# Altium footprint library MY_LIB_Connectors_JST.PcbLib: 118 footprints (part 7 of 8)
Each footprint in its own frame and in the unit in brackets; x right, y up, seen from the top. Pads: shape width x height; smd on the part's side, far side on the other; paste and mask are expansions set on the pad; w line width, h text height; cw(c..) or ccw(c..) is an arc to the next point about the centre after c.
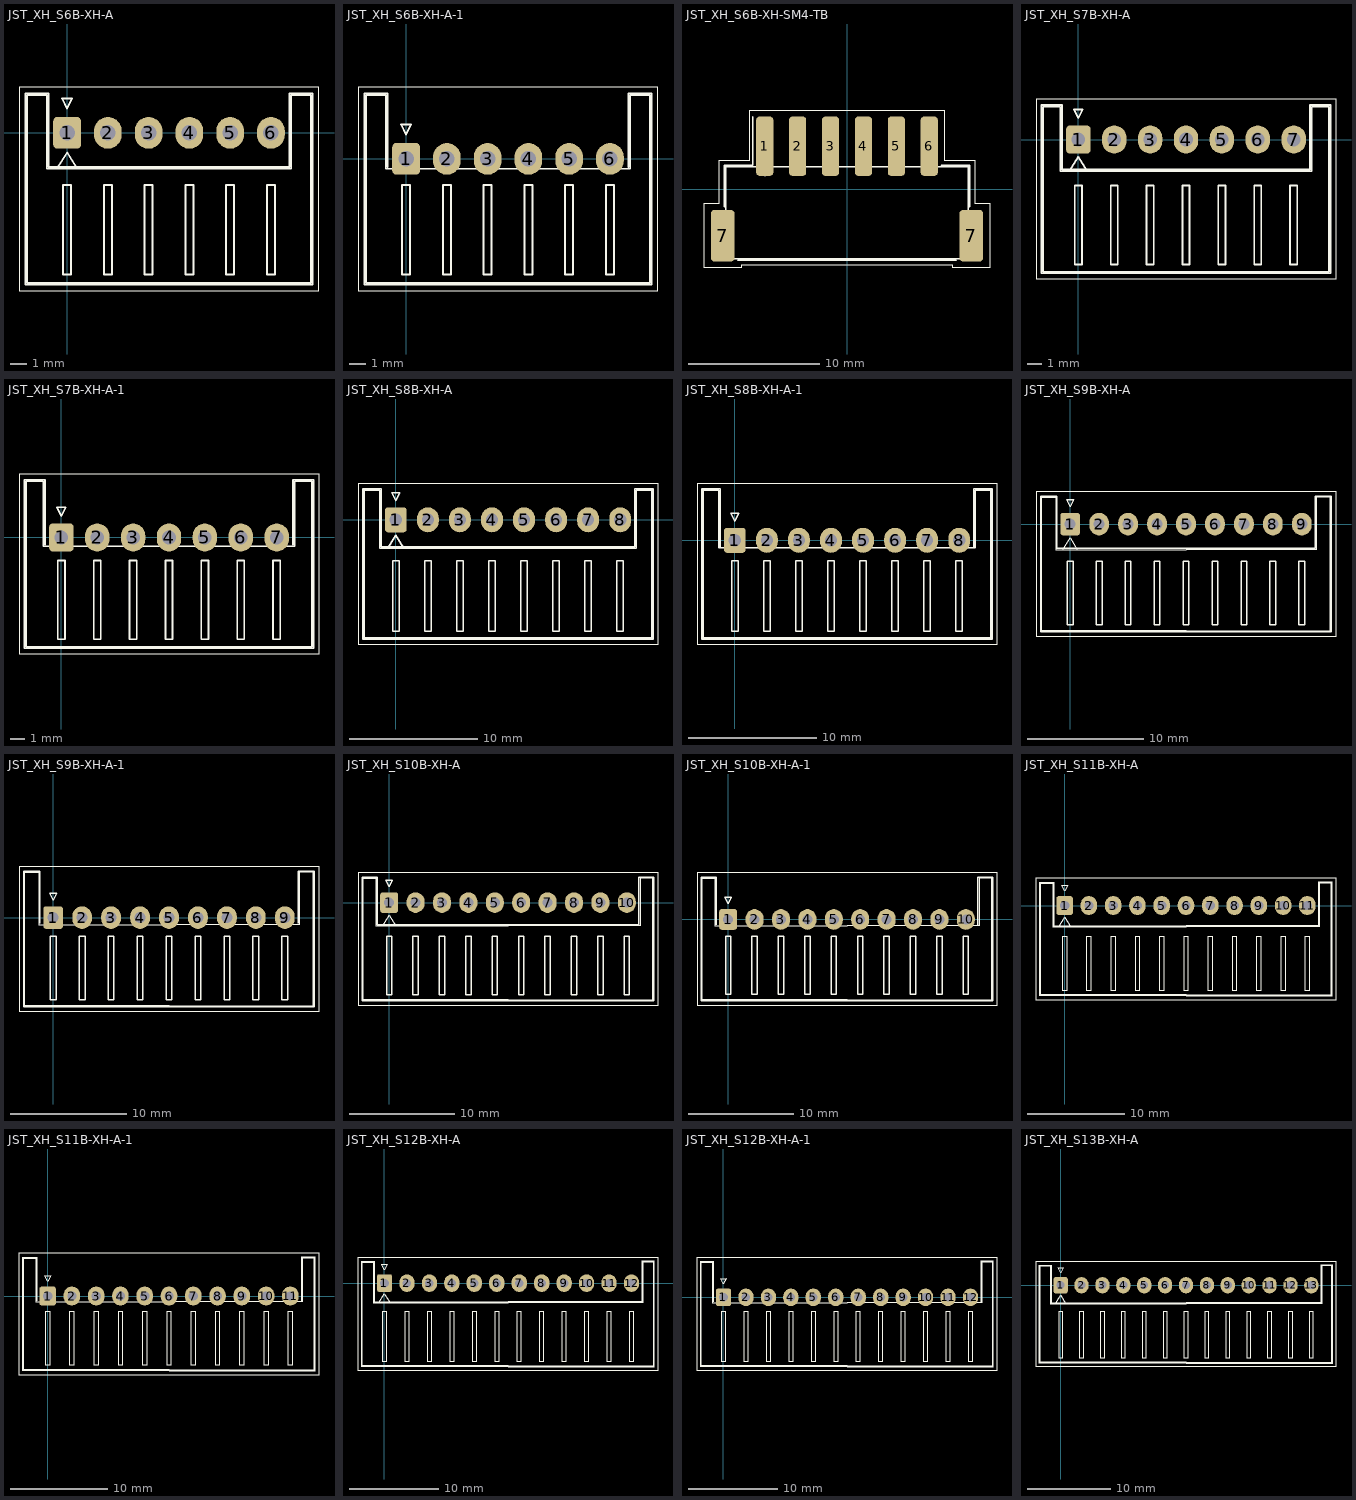
[diagram p6: the footprints below, top view; thin cyan lines are the x and y axes]

## JST_XH_S6B-XH-A [mm] "JST S6B-XH-A; reviewed KiCad footprint; ready STEP reference model"
height 6.1
pads (6):
  rrect29% 1.7x1.95 hole 0.95: 1(0,0)
  oval 1.7x1.95 hole 0.95: 2(2.5,0) 3(5,0) 4(7.5,0) 5(10,0) 6(12.5,0)
Top Overlay:
  lines w0.05: -2.95,-9.7 -2.95,2.81 15.45,2.81 15.45,-9.7 -2.95,-9.7
  lines w0.1: -0.625,-2.2 0,-1.2 0.625,-2.2 ; -2.45,-9.2 -2.45,2.3 -1.25,2.3 -1.25,-2.2 6.25,-2.2 13.75,-2.2 13.75,2.3 14.95,2.3 14.95,-9.2 6.25,-9.2 -2.45,-9.2
  lines w0.12: -2.56,-9.31 -2.56,2.41 -1.14,2.41 -1.14,-2.09 6.25,-2.09 13.64,-2.09 13.64,2.41 15.06,2.41 15.06,-9.31 6.25,-9.31 -2.56,-9.31 ; -0.3,2.1 0.3,2.1 0,1.5 -0.3,2.1 ; -0.25,-8.7 -0.25,-3.2 0.25,-3.2 0.25,-8.7 -0.25,-8.7 ; 2.25,-8.7 2.25,-3.2 2.75,-3.2 2.75,-8.7 2.25,-8.7 ; 4.75,-8.7 4.75,-3.2 5.25,-3.2 5.25,-8.7 4.75,-8.7 ; 7.25,-8.7 7.25,-3.2 7.75,-3.2 7.75,-8.7 7.25,-8.7 ; 9.75,-8.7 9.75,-3.2 10.25,-3.2 10.25,-8.7 9.75,-8.7 ; 12.25,-8.7 12.25,-3.2 12.75,-3.2 12.75,-8.7 12.25,-8.7
3D body "JST_XH_S6B-XH-A_1x06_P2.50mm_Horizontal.step": height 6.1, standoff -3.4, extent -2.45,-9.2 14.95,2.3

## JST_XH_S6B-XH-A-1 [mm] "JST S6B-XH-A-1; reviewed KiCad footprint; ready STEP reference model"
height 6.1
pads (6):
  rrect29% 1.7x1.95 hole 0.95: 1(0,0)
  oval 1.7x1.95 hole 0.95: 2(2.5,0) 3(5,0) 4(7.5,0) 5(10,0) 6(12.5,0)
Top Overlay:
  lines w0.05: -2.95,-8.1 -2.95,4.4 15.45,4.4 15.45,-8.1 -2.95,-8.1
  lines w0.1: -0.625,-0.6 0,0.4 0.625,-0.6 ; -2.45,-7.6 -2.45,3.9 -1.25,3.9 -1.25,-0.6 6.25,-0.6 13.75,-0.6 13.75,3.9 14.95,3.9 14.95,-7.6 6.25,-7.6 -2.45,-7.6
  lines w0.12: -1.14,-0.49 -1.14,4.01 -2.56,4.01 -2.56,-7.71 6.25,-7.71 15.06,-7.71 15.06,4.01 13.64,4.01 13.64,-0.49 ; -0.3,2.1 0.3,2.1 0,1.5 -0.3,2.1 ; -0.25,-7.1 -0.25,-1.6 0.25,-1.6 0.25,-7.1 -0.25,-7.1 ; 2.25,-7.1 2.25,-1.6 2.75,-1.6 2.75,-7.1 2.25,-7.1 ; 4.75,-7.1 4.75,-1.6 5.25,-1.6 5.25,-7.1 4.75,-7.1 ; 7.25,-7.1 7.25,-1.6 7.75,-1.6 7.75,-7.1 7.25,-7.1 ; 9.75,-7.1 9.75,-1.6 10.25,-1.6 10.25,-7.1 9.75,-7.1 ; 12.25,-7.1 12.25,-1.6 12.75,-1.6 12.75,-7.1 12.25,-7.1
3D body "JST_XH_S6B-XH-A-1_1x06_P2.50mm_Horizontal.step": height 6.1, standoff -3.4, extent -2.45,-7.6 14.95,3.9

## JST_XH_S6B-XH-SM4-TB [mm] "JST S6B-XH-SM4-TB; reviewed KiCad footprint; ready STEP reference model"
height 6
pads (8):
  rrect38% 1.3x4.5 all layers, no hole: 1(-6.25,3.25) 2(-3.75,3.25) 3(-1.25,3.25) 4(1.25,3.25) 5(3.75,3.25) 6(6.25,3.25)
  rrect28% 1.8x3.9 all layers, no hole: 7(-9.45,-3.55) 7(9.45,-3.55)
Top Overlay:
  lines w0.05: -10.85,-6 -10.85,-1.09 -9.7,-1.09 -9.7,2.2 -7.4,2.2 -7.4,6 7.4,6 7.4,2.2 9.7,2.2 9.7,-1.09 10.85,-1.09 10.85,-6 8.04,-6 8.04,-5.8 -8.04,-5.8 -8.04,-6 -10.85,-6
  lines w0.1: -6.75,1.7 -6.25,0.993 -5.75,1.7 ; -9.2,-5.3 -9.2,1.7 9.2,1.7 9.2,-5.3 -9.2,-5.3
  lines w0.12: -9.31,-1.34 -9.31,1.81 -7.16,1.81 -7.16,5.5 ; -8.29,-5.41 8.29,-5.41 ; 7.16,1.81 9.31,1.81 9.31,-1.34
3D body "JST_XH_S6B-XH-SM4-TB_1x06-1MP_P2.50mm_Horizontal.step": height 6, standoff 0, extent -9.2,-5.3 9.2,1.7

## JST_XH_S7B-XH-A [mm] "JST S7B-XH-A; reviewed KiCad footprint; ready STEP reference model"
height 6.1
pads (7):
  rrect29% 1.7x1.95 hole 0.95: 1(0,0)
  oval 1.7x1.95 hole 0.95: 2(2.5,0) 3(5,0) 4(7.5,0) 5(10,0) 6(12.5,0) 7(15,0)
Top Overlay:
  lines w0.05: -2.95,-9.7 -2.95,2.81 17.95,2.81 17.95,-9.7 -2.95,-9.7
  lines w0.1: -0.625,-2.2 0,-1.2 0.625,-2.2 ; -2.45,-9.2 -2.45,2.3 -1.25,2.3 -1.25,-2.2 7.5,-2.2 16.25,-2.2 16.25,2.3 17.45,2.3 17.45,-9.2 7.5,-9.2 -2.45,-9.2
  lines w0.12: -2.56,-9.31 -2.56,2.41 -1.14,2.41 -1.14,-2.09 7.5,-2.09 16.14,-2.09 16.14,2.41 17.56,2.41 17.56,-9.31 7.5,-9.31 -2.56,-9.31 ; -0.3,2.1 0.3,2.1 0,1.5 -0.3,2.1 ; -0.25,-8.7 -0.25,-3.2 0.25,-3.2 0.25,-8.7 -0.25,-8.7 ; 2.25,-8.7 2.25,-3.2 2.75,-3.2 2.75,-8.7 2.25,-8.7 ; 4.75,-8.7 4.75,-3.2 5.25,-3.2 5.25,-8.7 4.75,-8.7 ; 7.25,-8.7 7.25,-3.2 7.75,-3.2 7.75,-8.7 7.25,-8.7 ; 9.75,-8.7 9.75,-3.2 10.25,-3.2 10.25,-8.7 9.75,-8.7 ; 12.25,-8.7 12.25,-3.2 12.75,-3.2 12.75,-8.7 12.25,-8.7 ; 14.75,-8.7 14.75,-3.2 15.25,-3.2 15.25,-8.7 14.75,-8.7
3D body "JST_XH_S7B-XH-A_1x07_P2.50mm_Horizontal.step": height 6.1, standoff -3.4, extent -2.45,-9.2 17.45,2.3

## JST_XH_S7B-XH-A-1 [mm] "JST S7B-XH-A-1; reviewed KiCad footprint; ready STEP reference model"
height 6.1
pads (7):
  rrect29% 1.7x1.95 hole 0.95: 1(0,0)
  oval 1.7x1.95 hole 0.95: 2(2.5,0) 3(5,0) 4(7.5,0) 5(10,0) 6(12.5,0) 7(15,0)
Top Overlay:
  lines w0.05: -2.95,-8.1 -2.95,4.4 17.95,4.4 17.95,-8.1 -2.95,-8.1
  lines w0.1: -0.625,-0.6 0,0.4 0.625,-0.6 ; -2.45,-7.6 -2.45,3.9 -1.25,3.9 -1.25,-0.6 7.5,-0.6 16.25,-0.6 16.25,3.9 17.45,3.9 17.45,-7.6 7.5,-7.6 -2.45,-7.6
  lines w0.12: -1.14,-0.49 -1.14,4.01 -2.56,4.01 -2.56,-7.71 7.5,-7.71 17.56,-7.71 17.56,4.01 16.14,4.01 16.14,-0.49 ; -0.3,2.1 0.3,2.1 0,1.5 -0.3,2.1 ; -0.25,-7.1 -0.25,-1.6 0.25,-1.6 0.25,-7.1 -0.25,-7.1 ; 2.25,-7.1 2.25,-1.6 2.75,-1.6 2.75,-7.1 2.25,-7.1 ; 4.75,-7.1 4.75,-1.6 5.25,-1.6 5.25,-7.1 4.75,-7.1 ; 7.25,-7.1 7.25,-1.6 7.75,-1.6 7.75,-7.1 7.25,-7.1 ; 9.75,-7.1 9.75,-1.6 10.25,-1.6 10.25,-7.1 9.75,-7.1 ; 12.25,-7.1 12.25,-1.6 12.75,-1.6 12.75,-7.1 12.25,-7.1 ; 14.75,-7.1 14.75,-1.6 15.25,-1.6 15.25,-7.1 14.75,-7.1
3D body "JST_XH_S7B-XH-A-1_1x07_P2.50mm_Horizontal.step": height 6.1, standoff -3.4, extent -2.45,-7.6 17.45,3.9

## JST_XH_S8B-XH-A [mm] "JST S8B-XH-A; reviewed KiCad footprint; ready STEP reference model"
height 6.1
pads (8):
  rrect29% 1.7x1.95 hole 0.95: 1(0,0)
  oval 1.7x1.95 hole 0.95: 2(2.5,0) 3(5,0) 4(7.5,0) 5(10,0) 6(12.5,0) 7(15,0) 8(17.5,0)
Top Overlay:
  lines w0.05: -2.95,-9.7 -2.95,2.81 20.45,2.81 20.45,-9.7 -2.95,-9.7
  lines w0.1: -0.625,-2.2 0,-1.2 0.625,-2.2 ; -2.45,-9.2 -2.45,2.3 -1.25,2.3 -1.25,-2.2 8.75,-2.2 18.75,-2.2 18.75,2.3 19.95,2.3 19.95,-9.2 8.75,-9.2 -2.45,-9.2
  lines w0.12: -2.56,-9.31 -2.56,2.41 -1.14,2.41 -1.14,-2.09 8.75,-2.09 18.64,-2.09 18.64,2.41 20.06,2.41 20.06,-9.31 8.75,-9.31 -2.56,-9.31 ; -0.3,2.1 0.3,2.1 0,1.5 -0.3,2.1 ; -0.25,-8.7 -0.25,-3.2 0.25,-3.2 0.25,-8.7 -0.25,-8.7 ; 2.25,-8.7 2.25,-3.2 2.75,-3.2 2.75,-8.7 2.25,-8.7 ; 4.75,-8.7 4.75,-3.2 5.25,-3.2 5.25,-8.7 4.75,-8.7 ; 7.25,-8.7 7.25,-3.2 7.75,-3.2 7.75,-8.7 7.25,-8.7 ; 9.75,-8.7 9.75,-3.2 10.25,-3.2 10.25,-8.7 9.75,-8.7 ; 12.25,-8.7 12.25,-3.2 12.75,-3.2 12.75,-8.7 12.25,-8.7 ; 14.75,-8.7 14.75,-3.2 15.25,-3.2 15.25,-8.7 14.75,-8.7 ; 17.25,-8.7 17.25,-3.2 17.75,-3.2 17.75,-8.7 17.25,-8.7
3D body "JST_XH_S8B-XH-A_1x08_P2.50mm_Horizontal.step": height 6.1, standoff -3.4, extent -2.45,-9.2 19.95,2.3

## JST_XH_S8B-XH-A-1 [mm] "JST S8B-XH-A-1; reviewed KiCad footprint; ready STEP reference model"
height 6.1
pads (8):
  rrect29% 1.7x1.95 hole 0.95: 1(0,0)
  oval 1.7x1.95 hole 0.95: 2(2.5,0) 3(5,0) 4(7.5,0) 5(10,0) 6(12.5,0) 7(15,0) 8(17.5,0)
Top Overlay:
  lines w0.05: -2.95,-8.1 -2.95,4.4 20.45,4.4 20.45,-8.1 -2.95,-8.1
  lines w0.1: -0.625,-0.6 0,0.4 0.625,-0.6 ; -2.45,-7.6 -2.45,3.9 -1.25,3.9 -1.25,-0.6 8.75,-0.6 18.75,-0.6 18.75,3.9 19.95,3.9 19.95,-7.6 8.75,-7.6 -2.45,-7.6
  lines w0.12: -1.14,-0.49 -1.14,4.01 -2.56,4.01 -2.56,-7.71 8.75,-7.71 20.06,-7.71 20.06,4.01 18.64,4.01 18.64,-0.49 ; -0.3,2.1 0.3,2.1 0,1.5 -0.3,2.1 ; -0.25,-7.1 -0.25,-1.6 0.25,-1.6 0.25,-7.1 -0.25,-7.1 ; 2.25,-7.1 2.25,-1.6 2.75,-1.6 2.75,-7.1 2.25,-7.1 ; 4.75,-7.1 4.75,-1.6 5.25,-1.6 5.25,-7.1 4.75,-7.1 ; 7.25,-7.1 7.25,-1.6 7.75,-1.6 7.75,-7.1 7.25,-7.1 ; 9.75,-7.1 9.75,-1.6 10.25,-1.6 10.25,-7.1 9.75,-7.1 ; 12.25,-7.1 12.25,-1.6 12.75,-1.6 12.75,-7.1 12.25,-7.1 ; 14.75,-7.1 14.75,-1.6 15.25,-1.6 15.25,-7.1 14.75,-7.1 ; 17.25,-7.1 17.25,-1.6 17.75,-1.6 17.75,-7.1 17.25,-7.1
3D body "JST_XH_S8B-XH-A-1_1x08_P2.50mm_Horizontal.step": height 6.1, standoff -3.4, extent -2.45,-7.6 19.95,3.9

## JST_XH_S9B-XH-A [mm] "JST S9B-XH-A; reviewed KiCad footprint; ready STEP reference model"
height 6.1
pads (9):
  rrect29% 1.7x1.95 hole 0.95: 1(0,0)
  oval 1.7x1.95 hole 0.95: 2(2.5,0) 3(5,0) 4(7.5,0) 5(10,0) 6(12.5,0) 7(15,0) 8(17.5,0) 9(20,0)
Top Overlay:
  lines w0.05: -2.95,-9.7 -2.95,2.81 22.95,2.81 22.95,-9.7 -2.95,-9.7
  lines w0.1: -0.625,-2.2 0,-1.2 0.625,-2.2 ; -2.45,-9.2 -2.45,2.3 -1.25,2.3 -1.25,-2.2 10,-2.2 21.25,-2.2 21.25,2.3 22.45,2.3 22.45,-9.2 10,-9.2 -2.45,-9.2
  lines w0.12: -2.56,-9.31 -2.56,2.41 -1.14,2.41 -1.14,-2.09 10,-2.09 21.14,-2.09 21.14,2.41 22.56,2.41 22.56,-9.31 10,-9.31 -2.56,-9.31 ; -0.3,2.1 0.3,2.1 0,1.5 -0.3,2.1 ; -0.25,-8.7 -0.25,-3.2 0.25,-3.2 0.25,-8.7 -0.25,-8.7 ; 2.25,-8.7 2.25,-3.2 2.75,-3.2 2.75,-8.7 2.25,-8.7 ; 4.75,-8.7 4.75,-3.2 5.25,-3.2 5.25,-8.7 4.75,-8.7 ; 7.25,-8.7 7.25,-3.2 7.75,-3.2 7.75,-8.7 7.25,-8.7 ; 9.75,-8.7 9.75,-3.2 10.25,-3.2 10.25,-8.7 9.75,-8.7 ; 12.25,-8.7 12.25,-3.2 12.75,-3.2 12.75,-8.7 12.25,-8.7 ; 14.75,-8.7 14.75,-3.2 15.25,-3.2 15.25,-8.7 14.75,-8.7 ; 17.25,-8.7 17.25,-3.2 17.75,-3.2 17.75,-8.7 17.25,-8.7 ; 19.75,-8.7 19.75,-3.2 20.25,-3.2 20.25,-8.7 19.75,-8.7
3D body "JST_XH_S9B-XH-A_1x09_P2.50mm_Horizontal.step": height 6.1, standoff -3.4, extent -2.45,-9.2 22.45,2.3

## JST_XH_S9B-XH-A-1 [mm] "JST S9B-XH-A-1; reviewed KiCad footprint; ready STEP reference model"
height 6.1
pads (9):
  rrect29% 1.7x1.95 hole 0.95: 1(0,0)
  oval 1.7x1.95 hole 0.95: 2(2.5,0) 3(5,0) 4(7.5,0) 5(10,0) 6(12.5,0) 7(15,0) 8(17.5,0) 9(20,0)
Top Overlay:
  lines w0.05: -2.95,-8.1 -2.95,4.4 22.95,4.4 22.95,-8.1 -2.95,-8.1
  lines w0.1: -0.625,-0.6 0,0.4 0.625,-0.6 ; -2.45,-7.6 -2.45,3.9 -1.25,3.9 -1.25,-0.6 10,-0.6 21.25,-0.6 21.25,3.9 22.45,3.9 22.45,-7.6 10,-7.6 -2.45,-7.6
  lines w0.12: -1.14,-0.49 -1.14,4.01 -2.56,4.01 -2.56,-7.71 10,-7.71 22.56,-7.71 22.56,4.01 21.14,4.01 21.14,-0.49 ; -0.3,2.1 0.3,2.1 0,1.5 -0.3,2.1 ; -0.25,-7.1 -0.25,-1.6 0.25,-1.6 0.25,-7.1 -0.25,-7.1 ; 2.25,-7.1 2.25,-1.6 2.75,-1.6 2.75,-7.1 2.25,-7.1 ; 4.75,-7.1 4.75,-1.6 5.25,-1.6 5.25,-7.1 4.75,-7.1 ; 7.25,-7.1 7.25,-1.6 7.75,-1.6 7.75,-7.1 7.25,-7.1 ; 9.75,-7.1 9.75,-1.6 10.25,-1.6 10.25,-7.1 9.75,-7.1 ; 12.25,-7.1 12.25,-1.6 12.75,-1.6 12.75,-7.1 12.25,-7.1 ; 14.75,-7.1 14.75,-1.6 15.25,-1.6 15.25,-7.1 14.75,-7.1 ; 17.25,-7.1 17.25,-1.6 17.75,-1.6 17.75,-7.1 17.25,-7.1 ; 19.75,-7.1 19.75,-1.6 20.25,-1.6 20.25,-7.1 19.75,-7.1
3D body "JST_XH_S9B-XH-A-1_1x09_P2.50mm_Horizontal.step": height 6.1, standoff -3.4, extent -2.45,-7.6 22.45,3.9

## JST_XH_S10B-XH-A [mm] "JST S10B-XH-A; reviewed KiCad footprint; ready STEP reference model"
height 6.1
pads (10):
  rrect29% 1.7x1.95 hole 0.95: 1(0,0)
  oval 1.7x1.95 hole 0.95: 2(2.5,0) 3(5,0) 4(7.5,0) 5(10,0) 6(12.5,0) 7(15,0) 8(17.5,0) 9(20,0) 10(22.5,0)
Top Overlay:
  lines w0.05: -2.95,-9.7 -2.95,2.81 25.45,2.81 25.45,-9.7 -2.95,-9.7
  lines w0.1: -0.625,-2.2 0,-1.2 0.625,-2.2 ; -2.45,-9.2 -2.45,2.3 -1.25,2.3 -1.25,-2.2 11.25,-2.2 23.75,-2.2 23.75,2.3 24.95,2.3 24.95,-9.2 11.25,-9.2 -2.45,-9.2
  lines w0.12: -2.56,-9.31 -2.56,2.41 -1.14,2.41 -1.14,-2.09 11.25,-2.09 23.64,-2.09 23.64,2.41 25.06,2.41 25.06,-9.31 11.25,-9.31 -2.56,-9.31 ; -0.3,2.1 0.3,2.1 0,1.5 -0.3,2.1 ; -0.25,-8.7 -0.25,-3.2 0.25,-3.2 0.25,-8.7 -0.25,-8.7 ; 2.25,-8.7 2.25,-3.2 2.75,-3.2 2.75,-8.7 2.25,-8.7 ; 4.75,-8.7 4.75,-3.2 5.25,-3.2 5.25,-8.7 4.75,-8.7 ; 7.25,-8.7 7.25,-3.2 7.75,-3.2 7.75,-8.7 7.25,-8.7 ; 9.75,-8.7 9.75,-3.2 10.25,-3.2 10.25,-8.7 9.75,-8.7 ; 12.25,-8.7 12.25,-3.2 12.75,-3.2 12.75,-8.7 12.25,-8.7 ; 14.75,-8.7 14.75,-3.2 15.25,-3.2 15.25,-8.7 14.75,-8.7 ; 17.25,-8.7 17.25,-3.2 17.75,-3.2 17.75,-8.7 17.25,-8.7 ; 19.75,-8.7 19.75,-3.2 20.25,-3.2 20.25,-8.7 19.75,-8.7 ; 22.25,-8.7 22.25,-3.2 22.75,-3.2 22.75,-8.7 22.25,-8.7
3D body "JST_XH_S10B-XH-A_1x10_P2.50mm_Horizontal.step": height 6.1, standoff -3.4, extent -2.45,-9.2 24.95,2.3

## JST_XH_S10B-XH-A-1 [mm] "JST S10B-XH-A-1; reviewed KiCad footprint; ready STEP reference model"
height 6.1
pads (10):
  rrect29% 1.7x1.95 hole 0.95: 1(0,0)
  oval 1.7x1.95 hole 0.95: 2(2.5,0) 3(5,0) 4(7.5,0) 5(10,0) 6(12.5,0) 7(15,0) 8(17.5,0) 9(20,0) 10(22.5,0)
Top Overlay:
  lines w0.05: -2.95,-8.1 -2.95,4.4 25.45,4.4 25.45,-8.1 -2.95,-8.1
  lines w0.1: -0.625,-0.6 0,0.4 0.625,-0.6 ; -2.45,-7.6 -2.45,3.9 -1.25,3.9 -1.25,-0.6 11.25,-0.6 23.75,-0.6 23.75,3.9 24.95,3.9 24.95,-7.6 11.25,-7.6 -2.45,-7.6
  lines w0.12: -1.14,-0.49 -1.14,4.01 -2.56,4.01 -2.56,-7.71 11.25,-7.71 25.06,-7.71 25.06,4.01 23.64,4.01 23.64,-0.49 ; -0.3,2.1 0.3,2.1 0,1.5 -0.3,2.1 ; -0.25,-7.1 -0.25,-1.6 0.25,-1.6 0.25,-7.1 -0.25,-7.1 ; 2.25,-7.1 2.25,-1.6 2.75,-1.6 2.75,-7.1 2.25,-7.1 ; 4.75,-7.1 4.75,-1.6 5.25,-1.6 5.25,-7.1 4.75,-7.1 ; 7.25,-7.1 7.25,-1.6 7.75,-1.6 7.75,-7.1 7.25,-7.1 ; 9.75,-7.1 9.75,-1.6 10.25,-1.6 10.25,-7.1 9.75,-7.1 ; 12.25,-7.1 12.25,-1.6 12.75,-1.6 12.75,-7.1 12.25,-7.1 ; 14.75,-7.1 14.75,-1.6 15.25,-1.6 15.25,-7.1 14.75,-7.1 ; 17.25,-7.1 17.25,-1.6 17.75,-1.6 17.75,-7.1 17.25,-7.1 ; 19.75,-7.1 19.75,-1.6 20.25,-1.6 20.25,-7.1 19.75,-7.1 ; 22.25,-7.1 22.25,-1.6 22.75,-1.6 22.75,-7.1 22.25,-7.1
3D body "JST_XH_S10B-XH-A-1_1x10_P2.50mm_Horizontal.step": height 6.1, standoff -3.4, extent -2.45,-7.6 24.95,3.9

## JST_XH_S11B-XH-A [mm] "JST S11B-XH-A; reviewed KiCad footprint; ready STEP reference model"
height 6.1
pads (11):
  rrect29% 1.7x1.95 hole 0.95: 1(0,0)
  oval 1.7x1.95 hole 0.95: 2(2.5,0) 3(5,0) 4(7.5,0) 5(10,0) 6(12.5,0) 7(15,0) 8(17.5,0) 9(20,0) 10(22.5,0) 11(25,0)
Top Overlay:
  lines w0.05: -2.95,-9.7 -2.95,2.81 27.95,2.81 27.95,-9.7 -2.95,-9.7
  lines w0.1: -0.625,-2.2 0,-1.2 0.625,-2.2 ; -2.45,-9.2 -2.45,2.3 -1.25,2.3 -1.25,-2.2 12.5,-2.2 26.25,-2.2 26.25,2.3 27.45,2.3 27.45,-9.2 12.5,-9.2 -2.45,-9.2
  lines w0.12: -2.56,-9.31 -2.56,2.41 -1.14,2.41 -1.14,-2.09 12.5,-2.09 26.14,-2.09 26.14,2.41 27.56,2.41 27.56,-9.31 12.5,-9.31 -2.56,-9.31 ; -0.3,2.1 0.3,2.1 0,1.5 -0.3,2.1 ; -0.25,-8.7 -0.25,-3.2 0.25,-3.2 0.25,-8.7 -0.25,-8.7 ; 2.25,-8.7 2.25,-3.2 2.75,-3.2 2.75,-8.7 2.25,-8.7 ; 4.75,-8.7 4.75,-3.2 5.25,-3.2 5.25,-8.7 4.75,-8.7 ; 7.25,-8.7 7.25,-3.2 7.75,-3.2 7.75,-8.7 7.25,-8.7 ; 9.75,-8.7 9.75,-3.2 10.25,-3.2 10.25,-8.7 9.75,-8.7 ; 12.25,-8.7 12.25,-3.2 12.75,-3.2 12.75,-8.7 12.25,-8.7 ; 14.75,-8.7 14.75,-3.2 15.25,-3.2 15.25,-8.7 14.75,-8.7 ; 17.25,-8.7 17.25,-3.2 17.75,-3.2 17.75,-8.7 17.25,-8.7 ; 19.75,-8.7 19.75,-3.2 20.25,-3.2 20.25,-8.7 19.75,-8.7 ; 22.25,-8.7 22.25,-3.2 22.75,-3.2 22.75,-8.7 22.25,-8.7 ; 24.75,-8.7 24.75,-3.2 25.25,-3.2 25.25,-8.7 24.75,-8.7
3D body "JST_XH_S11B-XH-A_1x11_P2.50mm_Horizontal.step": height 6.1, standoff -3.4, extent -2.45,-9.2 27.45,2.3

## JST_XH_S11B-XH-A-1 [mm] "JST S11B-XH-A-1; reviewed KiCad footprint; ready STEP reference model"
height 6.1
pads (11):
  rrect29% 1.7x1.95 hole 0.95: 1(0,0)
  oval 1.7x1.95 hole 0.95: 2(2.5,0) 3(5,0) 4(7.5,0) 5(10,0) 6(12.5,0) 7(15,0) 8(17.5,0) 9(20,0) 10(22.5,0) 11(25,0)
Top Overlay:
  lines w0.05: -2.95,-8.1 -2.95,4.4 27.95,4.4 27.95,-8.1 -2.95,-8.1
  lines w0.1: -0.625,-0.6 0,0.4 0.625,-0.6 ; -2.45,-7.6 -2.45,3.9 -1.25,3.9 -1.25,-0.6 12.5,-0.6 26.25,-0.6 26.25,3.9 27.45,3.9 27.45,-7.6 12.5,-7.6 -2.45,-7.6
  lines w0.12: -1.14,-0.49 -1.14,4.01 -2.56,4.01 -2.56,-7.71 12.5,-7.71 27.56,-7.71 27.56,4.01 26.14,4.01 26.14,-0.49 ; -0.3,2.1 0.3,2.1 0,1.5 -0.3,2.1 ; -0.25,-7.1 -0.25,-1.6 0.25,-1.6 0.25,-7.1 -0.25,-7.1 ; 2.25,-7.1 2.25,-1.6 2.75,-1.6 2.75,-7.1 2.25,-7.1 ; 4.75,-7.1 4.75,-1.6 5.25,-1.6 5.25,-7.1 4.75,-7.1 ; 7.25,-7.1 7.25,-1.6 7.75,-1.6 7.75,-7.1 7.25,-7.1 ; 9.75,-7.1 9.75,-1.6 10.25,-1.6 10.25,-7.1 9.75,-7.1 ; 12.25,-7.1 12.25,-1.6 12.75,-1.6 12.75,-7.1 12.25,-7.1 ; 14.75,-7.1 14.75,-1.6 15.25,-1.6 15.25,-7.1 14.75,-7.1 ; 17.25,-7.1 17.25,-1.6 17.75,-1.6 17.75,-7.1 17.25,-7.1 ; 19.75,-7.1 19.75,-1.6 20.25,-1.6 20.25,-7.1 19.75,-7.1 ; 22.25,-7.1 22.25,-1.6 22.75,-1.6 22.75,-7.1 22.25,-7.1 ; 24.75,-7.1 24.75,-1.6 25.25,-1.6 25.25,-7.1 24.75,-7.1
3D body "JST_XH_S11B-XH-A-1_1x11_P2.50mm_Horizontal.step": height 6.1, standoff -3.4, extent -2.45,-7.6 27.45,3.9

## JST_XH_S12B-XH-A [mm] "JST S12B-XH-A; reviewed KiCad footprint; ready STEP reference model"
height 6.1
pads (12):
  rrect29% 1.7x1.95 hole 0.95: 1(0,0)
  oval 1.7x1.95 hole 0.95: 2(2.5,0) 3(5,0) 4(7.5,0) 5(10,0) 6(12.5,0) 7(15,0) 8(17.5,0) 9(20,0) 10(22.5,0) 11(25,0) 12(27.5,0)
Top Overlay:
  lines w0.05: -2.95,-9.7 -2.95,2.81 30.45,2.81 30.45,-9.7 -2.95,-9.7
  lines w0.1: -0.625,-2.2 0,-1.2 0.625,-2.2 ; -2.45,-9.2 -2.45,2.3 -1.25,2.3 -1.25,-2.2 13.75,-2.2 28.75,-2.2 28.75,2.3 29.95,2.3 29.95,-9.2 13.75,-9.2 -2.45,-9.2
  lines w0.12: -2.56,-9.31 -2.56,2.41 -1.14,2.41 -1.14,-2.09 13.75,-2.09 28.64,-2.09 28.64,2.41 30.06,2.41 30.06,-9.31 13.75,-9.31 -2.56,-9.31 ; -0.3,2.1 0.3,2.1 0,1.5 -0.3,2.1 ; -0.25,-8.7 -0.25,-3.2 0.25,-3.2 0.25,-8.7 -0.25,-8.7 ; 2.25,-8.7 2.25,-3.2 2.75,-3.2 2.75,-8.7 2.25,-8.7 ; 4.75,-8.7 4.75,-3.2 5.25,-3.2 5.25,-8.7 4.75,-8.7 ; 7.25,-8.7 7.25,-3.2 7.75,-3.2 7.75,-8.7 7.25,-8.7 ; 9.75,-8.7 9.75,-3.2 10.25,-3.2 10.25,-8.7 9.75,-8.7 ; 12.25,-8.7 12.25,-3.2 12.75,-3.2 12.75,-8.7 12.25,-8.7 ; 14.75,-8.7 14.75,-3.2 15.25,-3.2 15.25,-8.7 14.75,-8.7 ; 17.25,-8.7 17.25,-3.2 17.75,-3.2 17.75,-8.7 17.25,-8.7 ; 19.75,-8.7 19.75,-3.2 20.25,-3.2 20.25,-8.7 19.75,-8.7 ; 22.25,-8.7 22.25,-3.2 22.75,-3.2 22.75,-8.7 22.25,-8.7 ; 24.75,-8.7 24.75,-3.2 25.25,-3.2 25.25,-8.7 24.75,-8.7 ; 27.25,-8.7 27.25,-3.2 27.75,-3.2 27.75,-8.7 27.25,-8.7
3D body "JST_XH_S12B-XH-A_1x12_P2.50mm_Horizontal.step": height 6.1, standoff -3.4, extent -2.45,-9.2 29.95,2.3

## JST_XH_S12B-XH-A-1 [mm] "JST S12B-XH-A-1; reviewed KiCad footprint; ready STEP reference model"
height 6.1
pads (12):
  rrect29% 1.7x1.95 hole 0.95: 1(0,0)
  oval 1.7x1.95 hole 0.95: 2(2.5,0) 3(5,0) 4(7.5,0) 5(10,0) 6(12.5,0) 7(15,0) 8(17.5,0) 9(20,0) 10(22.5,0) 11(25,0) 12(27.5,0)
Top Overlay:
  lines w0.05: -2.95,-8.1 -2.95,4.4 30.45,4.4 30.45,-8.1 -2.95,-8.1
  lines w0.1: -0.625,-0.6 0,0.4 0.625,-0.6 ; -2.45,-7.6 -2.45,3.9 -1.25,3.9 -1.25,-0.6 13.75,-0.6 28.75,-0.6 28.75,3.9 29.95,3.9 29.95,-7.6 13.75,-7.6 -2.45,-7.6
  lines w0.12: -1.14,-0.49 -1.14,4.01 -2.56,4.01 -2.56,-7.71 13.75,-7.71 30.06,-7.71 30.06,4.01 28.64,4.01 28.64,-0.49 ; -0.3,2.1 0.3,2.1 0,1.5 -0.3,2.1 ; -0.25,-7.1 -0.25,-1.6 0.25,-1.6 0.25,-7.1 -0.25,-7.1 ; 2.25,-7.1 2.25,-1.6 2.75,-1.6 2.75,-7.1 2.25,-7.1 ; 4.75,-7.1 4.75,-1.6 5.25,-1.6 5.25,-7.1 4.75,-7.1 ; 7.25,-7.1 7.25,-1.6 7.75,-1.6 7.75,-7.1 7.25,-7.1 ; 9.75,-7.1 9.75,-1.6 10.25,-1.6 10.25,-7.1 9.75,-7.1 ; 12.25,-7.1 12.25,-1.6 12.75,-1.6 12.75,-7.1 12.25,-7.1 ; 14.75,-7.1 14.75,-1.6 15.25,-1.6 15.25,-7.1 14.75,-7.1 ; 17.25,-7.1 17.25,-1.6 17.75,-1.6 17.75,-7.1 17.25,-7.1 ; 19.75,-7.1 19.75,-1.6 20.25,-1.6 20.25,-7.1 19.75,-7.1 ; 22.25,-7.1 22.25,-1.6 22.75,-1.6 22.75,-7.1 22.25,-7.1 ; 24.75,-7.1 24.75,-1.6 25.25,-1.6 25.25,-7.1 24.75,-7.1 ; 27.25,-7.1 27.25,-1.6 27.75,-1.6 27.75,-7.1 27.25,-7.1
3D body "JST_XH_S12B-XH-A-1_1x12_P2.50mm_Horizontal.step": height 6.1, standoff -3.4, extent -2.45,-7.6 29.95,3.9

## JST_XH_S13B-XH-A [mm] "JST S13B-XH-A; reviewed KiCad footprint; ready STEP reference model"
height 6.1
pads (13):
  rrect29% 1.7x1.95 hole 0.95: 1(0,0)
  oval 1.7x1.95 hole 0.95: 2(2.5,0) 3(5,0) 4(7.5,0) 5(10,0) 6(12.5,0) 7(15,0) 8(17.5,0) 9(20,0) 10(22.5,0) 11(25,0) 12(27.5,0) 13(30,0)
Top Overlay:
  lines w0.05: -2.95,-9.7 -2.95,2.81 32.95,2.81 32.95,-9.7 -2.95,-9.7
  lines w0.1: -0.625,-2.2 0,-1.2 0.625,-2.2 ; -2.45,-9.2 -2.45,2.3 -1.25,2.3 -1.25,-2.2 15,-2.2 31.25,-2.2 31.25,2.3 32.45,2.3 32.45,-9.2 15,-9.2 -2.45,-9.2
  lines w0.12: -2.56,-9.31 -2.56,2.41 -1.14,2.41 -1.14,-2.09 15,-2.09 31.14,-2.09 31.14,2.41 32.56,2.41 32.56,-9.31 15,-9.31 -2.56,-9.31 ; -0.3,2.1 0.3,2.1 0,1.5 -0.3,2.1 ; -0.25,-8.7 -0.25,-3.2 0.25,-3.2 0.25,-8.7 -0.25,-8.7 ; 2.25,-8.7 2.25,-3.2 2.75,-3.2 2.75,-8.7 2.25,-8.7 ; 4.75,-8.7 4.75,-3.2 5.25,-3.2 5.25,-8.7 4.75,-8.7 ; 7.25,-8.7 7.25,-3.2 7.75,-3.2 7.75,-8.7 7.25,-8.7 ; 9.75,-8.7 9.75,-3.2 10.25,-3.2 10.25,-8.7 9.75,-8.7 ; 12.25,-8.7 12.25,-3.2 12.75,-3.2 12.75,-8.7 12.25,-8.7 ; 14.75,-8.7 14.75,-3.2 15.25,-3.2 15.25,-8.7 14.75,-8.7 ; 17.25,-8.7 17.25,-3.2 17.75,-3.2 17.75,-8.7 17.25,-8.7 ; 19.75,-8.7 19.75,-3.2 20.25,-3.2 20.25,-8.7 19.75,-8.7 ; 22.25,-8.7 22.25,-3.2 22.75,-3.2 22.75,-8.7 22.25,-8.7 ; 24.75,-8.7 24.75,-3.2 25.25,-3.2 25.25,-8.7 24.75,-8.7 ; 27.25,-8.7 27.25,-3.2 27.75,-3.2 27.75,-8.7 27.25,-8.7 ; 29.75,-8.7 29.75,-3.2 30.25,-3.2 30.25,-8.7 29.75,-8.7
3D body "JST_XH_S13B-XH-A_1x13_P2.50mm_Horizontal.step": height 6.1, standoff -3.4, extent -2.45,-9.2 32.45,2.3